# Altium footprint library USB.PcbLib: 25 footprints (part 2 of 2)
Each footprint in its own frame and in the unit in brackets; x right, y up, seen from the top. Pads: shape width x height; smd on the part's side, far side on the other; paste and mask are expansions set on the pad; w line width, h text height; cw(c..) or ccw(c..) is an arc to the next point about the centre after c.
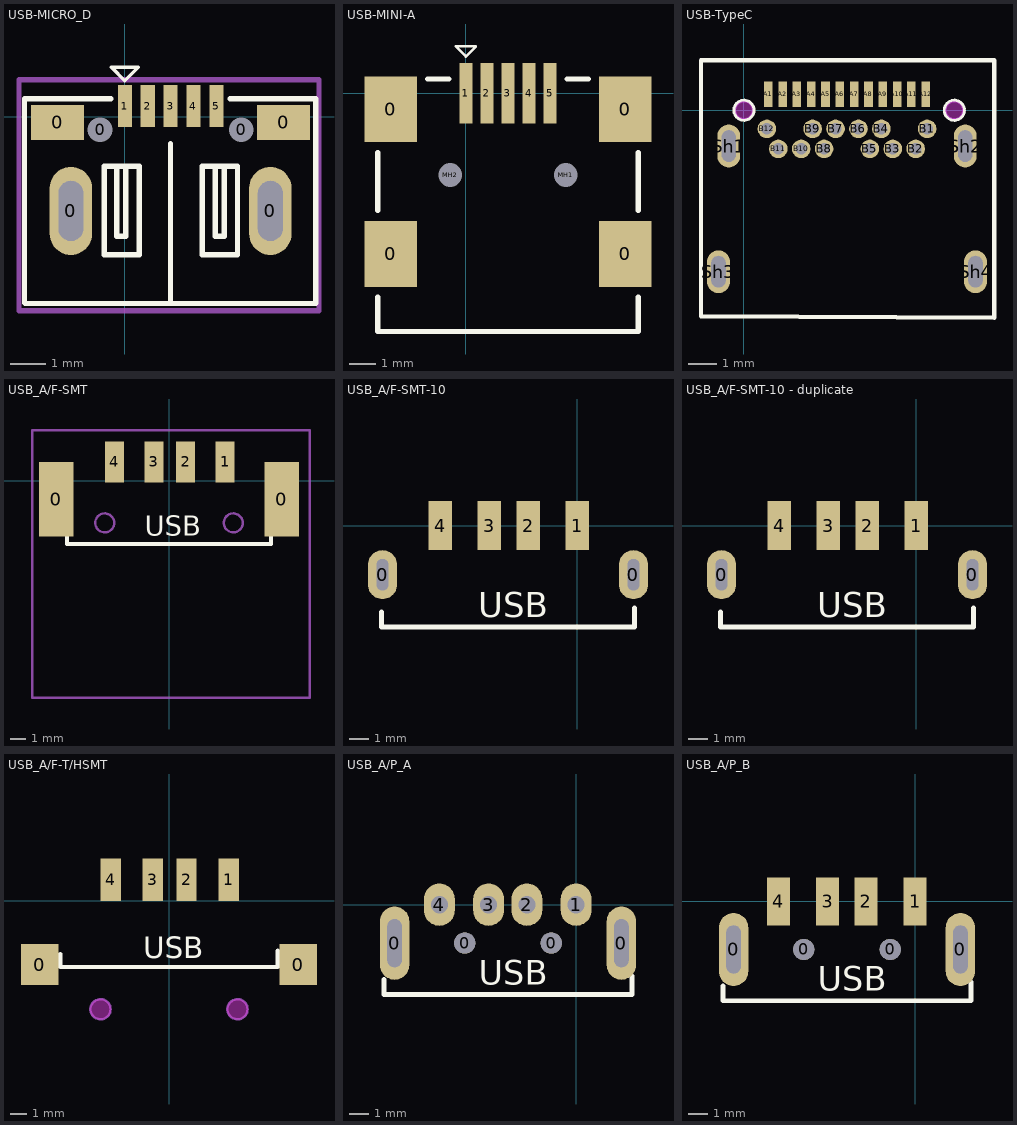
[diagram p1: the footprints below, top view; thin cyan lines are the x and y axes]

## USB-MICRO_D [mm]
pads (11):
  rect 1.5x1 smd: 0(-1.905,-0.167) 0(4.495,-0.167)
  oval 1.2x2.5 hole 0.7 slot 1.7 at 90 deg: 0(-1.53,-2.673) 0(4.12,-2.673)
  round 0.6 hole 0.7 unplated: 0(-0.705,-0.373) 0(3.295,-0.373)
  rect 0.4x1.2 smd: 1(0,0.3) 2(0.648,0.3) 3(1.295,0.3) 4(1.943,0.3) 5(2.591,0.3)
Top Overlay:
  lines w0.1: -0.381,1.397 0,1.016 0.381,1.397 -0.381,1.397
  lines w0.15: -2.845,0.508 -0.394,0.508 ; 1.295,-5.296 1.295,-0.762 ; 2.984,0.508 5.41,0.508
  lines w0.152: -2.845,-5.271 -2.845,0.508 ; -2.82,-5.296 5.385,-5.296 ; -0.229,-1.41 -0.229,-3.395 -0.025,-3.395 0.025,-3.395 0.025,-1.41 ; 2.565,-1.41 2.565,-3.395 2.819,-3.395 2.819,-1.41 ; 5.41,-5.296 5.41,0.508 ; -0.589,-3.91 0.411,-3.91 0.411,-1.41 -0.589,-1.41 -0.589,-3.91 ; 2.191,-3.91 2.191,-1.41 3.191,-1.41 3.191,-3.91 2.191,-3.91
Top Designator (Mech15):
  lines w0.152: -3,-5.5 -3,1.04 5.5,1.04 5.5,-5.5 -3,-5.5
  text "'.Designator'" at -2.5,-3.25 h1.52
3D body "USB-MICRO_D.STEP": height 2.8, standoff -1.35, extent -2.731,-5.346 5.271,0.254

## USB-MINI-A [mm]
pads (11):
  rect 2x2.5 smd: 0(-2.85,-6.108) 0(-2.85,-0.608) 0(6.05,-6.108) 0(6.05,-0.608)
  rect 0.5x2.3 smd: 1(0,0) 2(0.8,0) 3(1.6,0) 4(2.4,0) 5(3.2,0)
  round 0.6 hole 0.9 unplated: MH1(3.8,-3.108) MH2(-0.6,-3.108)
Top Overlay:
  lines w0.1: -0.381,1.778 0.381,1.778 0,1.397 -0.381,1.778
  lines w0.2: -3.35,-7.758 -3.35,-9.058 6.55,-9.058 6.55,-7.758 ; -3.35,-4.458 -3.35,-2.258 ; -1.45,0.542 -0.65,0.542 ; 3.85,0.542 4.65,0.542 ; 6.55,-4.458 6.55,-2.258
3D body "USB-MINI-A.STEP": height 3.95, standoff -0.7, extent -3.175,-9.041 6.325,0.659

## USB-TypeC [mm]
pads (28):
  rect 0.3x0.9 smd: A1(0.85,0.56) A2(1.35,0.56) A3(1.85,0.56) A4(2.35,0.56) A5(2.85,0.56) A6(3.35,0.56) A7(3.85,0.56) A8(4.35,0.56) A9(4.85,0.56) A10(5.35,0.56) A11(5.85,0.56) A12(6.35,0.56)
  round 0.65 hole 0.4: B1(6.4,-0.65) B2(6,-1.35) B3(5.2,-1.35) B4(4.8,-0.65) B5(4.4,-1.35) B6(4,-0.65) B7(3.2,-0.65) B8(2.8,-1.35) B9(2.4,-0.65) B10(2,-1.35) B11(1.2,-1.35) B12(0.8,-0.65)
  oval 0.8x1.5 hole 1.1 slot 0.5 at 0 deg: Sh1(-0.53,-1.25) Sh2(7.73,-1.25) Sh3(-0.89,-5.64) Sh4(8.09,-5.64)
Top Overlay:
  circle w0.1: c0,0 r0.354
  circle w0.1: c7.35,0 r0.354
  lines w0.152: -1.5,-7.2 8.75,-7.25 8.75,1.75 -1.5,1.75 -1.5,-7.2
Keep-Out Layer:
  board cut-out: 7.025,0 7.025,-0.065 7.074,-0.184 7.166,-0.276 7.285,-0.325 7.35,-0.325 7.415,-0.325 7.534,-0.276 7.626,-0.184 7.675,-0.065 7.675,0 7.675,0.065 7.626,0.184 7.534,0.276 7.415,0.325 7.35,0.325 7.285,0.325 7.166,0.276 7.074,0.184 7.025,0.065
  board cut-out: 0,-0.325 -0.065,-0.325 -0.184,-0.275 -0.276,-0.184 -0.325,-0.064 -0.325,0 -0.325,0.065 -0.276,0.185 -0.184,0.276 -0.065,0.325 0,0.325 0.065,0.325 0.184,0.276 0.276,0.185 0.325,0.065 0.325,0 0.325,-0.064 0.276,-0.184 0.184,-0.275 0.065,-0.325
Board Outline:
  circle w0.1: c7.35,0 r0.325
  circle w0.1: c0,0 r0.325
Mechanical 29:
  text "'.Designator'" at -0.75,-4.5 h1
3D body "USB-C.stp": height 3.17, standoff -1.02, extent -1.225,-7.1 8.425,1.6

## USB_A/F-SMT [mm] "反向"
height 7.8
pads (6):
  rect 2.2x4.7 smd: 0(-7.125,-1.175) 0(7.125,-1.175)
  rect 1.2x2.6 smd: 1(3.543,1.175) 2(1.043,1.175) 3(-0.957,1.175) 4(-3.457,1.175)
Top Overlay:
  lines w0.254: -6.45,-3.233 -6.45,-4 6.45,-4 6.45,-3.033
  text "USB" at -1.524,-3.492 h1.27
Board Outline:
  circle w0.15: c-4.06,-2.675 r0.6
  circle w0.15: c4.06,-2.675 r0.6
Top Designator (Mech15):
  lines w0.15: -8.636,-13.716 -8.636,3.175 -8,3.175 8,3.175 8.89,3.175 8.89,-13.716 -8.636,-13.716
  text "'.Designator'" at -6.469,-6.889 h2.03
3D body "c-292303-9-e-3d.stp": height 7.81, standoff -0.98, extent -8.624,-13.628 8.636,1.532

## USB_A/F-SMT-10 [mm] "反向"
height 1.75
pads (6):
  oval 1.5x2.5 hole 0.6 slot 1.6 at 90 deg: 0(-9.943,-2.508) 0(2.857,-2.508)
  rect 1.2x2.5 smd: 1(0,0) 2(-2.5,0) 3(-4.5,0) 4(-7,0)
Top Overlay:
  lines w0.254: -9.993,-4.408 -9.993,-5.175 2.907,-5.175 2.907,-4.208
  text "USB" at -5.067,-4.667 h1.27
3D body "c-1-292303-1-e-3d.stp": height 8.62, standoff -2.74, extent -11.66,-14.184 4.572,0.976

## USB_A/F-SMT-10 - duplicate [mm] "反向"
height 1.75
pads (6):
  oval 1.5x2.5 hole 0.6 slot 1.6 at 90 deg: 0(-9.943,-2.508) 0(2.857,-2.508)
  rect 1.2x2.5 smd: 1(0,0) 2(-2.5,0) 3(-4.5,0) 4(-7,0)
Top Overlay:
  lines w0.254: -9.993,-4.408 -9.993,-5.175 2.907,-5.175 2.907,-4.208
  text "USB" at -5.067,-4.667 h1.27

## USB_A/F-T/HSMT [mm] "反向"
height 1.75
pads (6):
  rect 2.22x2.44 smd: 0(-7.67,-3.78) 0(7.67,-3.78)
  rect 1.2x2.5 smd: 1(3.543,1.254) 2(1.043,1.254) 3(-0.957,1.254) 4(-3.457,1.254)
Top Overlay:
  lines w0.254: -6.45,-3.154 -6.45,-3.921 6.45,-3.921 6.45,-2.954
  text "USB" at -1.524,-3.413 h1.27
Keep-Out Layer:
  board cut-out: -4.66,-6.426 -4.66,-6.545 -4.569,-6.766 -4.4,-6.935 -4.179,-7.026 -4.06,-7.026 -3.941,-7.026 -3.72,-6.935 -3.551,-6.766 -3.46,-6.545 -3.46,-6.426 -3.46,-6.307 -3.551,-6.086 -3.72,-5.917 -3.941,-5.826 -4.06,-5.826 -4.179,-5.826 -4.4,-5.917 -4.569,-6.086 -4.66,-6.307
  board cut-out: 3.46,-6.426 3.46,-6.545 3.551,-6.766 3.72,-6.935 3.94,-7.026 4.06,-7.026 4.179,-7.026 4.4,-6.935 4.568,-6.766 4.66,-6.545 4.66,-6.426 4.66,-6.307 4.568,-6.086 4.4,-5.917 4.179,-5.826 4.06,-5.826 3.94,-5.826 3.72,-5.917 3.551,-6.086 3.46,-6.307
  board cut-out: -4.66,-6.426 -4.66,-6.545 -4.569,-6.766 -4.4,-6.935 -4.179,-7.026 -4.06,-7.026 -3.941,-7.026 -3.72,-6.935 -3.551,-6.766 -3.46,-6.545 -3.46,-6.426 -3.46,-6.307 -3.551,-6.086 -3.72,-5.917 -3.941,-5.826 -4.06,-5.826 -4.179,-5.826 -4.4,-5.917 -4.569,-6.086 -4.66,-6.307
Board Outline:
  circle w0.15: c4.06,-6.426 r0.6
  circle w0.15: c-4.06,-6.426 r0.6
3D body "c-292303-9-e-3d.stp": height 7.81, standoff -0.98, extent -8.624,-13.549 8.636,1.611

## USB_A/P_A [mm]
height 1.75
pads (8):
  oval 1.524x3.81 hole 0.762 slot 2.5 at 90 deg: 0(-9.443,-2) 0(2.357,-2)
  round 1.1 hole 1.1: 0(-5.793,-2) 0(-1.293,-2)
  oval 1.6x2.2 hole 0.9: 1(0,0) 2(-2.556,0) 3(-4.556,0) 4(-7.112,0)
Top Overlay:
  lines w0.254: -9.993,-3.9 -9.993,-4.667 2.907,-4.667 2.907,-3.7
  text "USB" at -5.067,-4.159 h1.27
3D body "USB_A_P-A.STEP": height 3.25, standoff -2.52, extent -10.033,-19.909 2.914,0.097

## USB_A/P_B [mm]
height 1.75
pads (8):
  oval 1.524x3.81 hole 0.762 slot 2.5 at 90 deg: 0(-9.443,-2.508) 0(2.357,-2.508)
  round 1.1 hole 1.1: 0(-5.793,-2.508) 0(-1.293,-2.508)
  rect 1.2x2.5 smd: 1(0,0) 2(-2.556,0) 3(-4.556,0) 4(-7.112,0)
Top Overlay:
  lines w0.254: -9.993,-4.408 -9.993,-5.175 2.907,-5.175 2.907,-4.208
  text "USB" at -5.067,-4.667 h1.27
3D body "USB_A_P-B.STEP": height 3.25, standoff -2.52, extent -9.906,-20.46 3.041,0.14